# Altium footprint library KBP206G.PcbLib: 1 footprints
Each footprint in its own frame and in the unit in brackets; x right, y up, seen from the top. Pads: shape width x height; smd on the part's side, far side on the other; paste and mask are expansions set on the pad; w line width, h text height; cw(c..) or ccw(c..) is an arc to the next point about the centre after c.
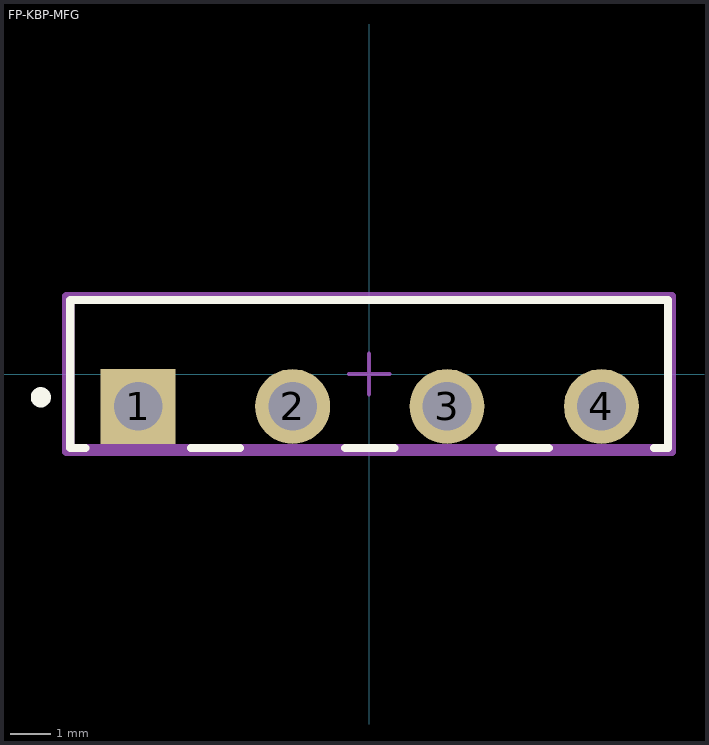
[diagram p0: the footprint, top view; thin cyan lines are the x and y axes]

## FP-KBP-MFG [mm]
pads (4):
  rect 1.85x1.85 hole 1.2 paste-2539.97 mask+0: 1(-5.7,-0.8)
  round 1.85 hole 1.2 paste-2539.97 mask+0: 2(-1.89,-0.8) 3(1.92,-0.8) 4(5.73,-0.8)
Top Overlay:
  circle w0.25: c-8.1,-0.575 r0.125
  lines w0.2: -7,-1.825 -7.375,-1.825 -7.375,1.825 7.375,1.825 7.375,-1.825 7.03,-1.825 ; -4.4,-1.825 -3.19,-1.825 ; -0.59,-1.825 0.62,-1.825 ; 3.22,-1.825 4.43,-1.825
Top Assembly:
  lines w0.2: -7.475,-1.925 -7.475,1.925 7.475,1.925 7.475,-1.925 -7.475,-1.925
  text ".Designator" at 0,0.189 h1
Top 3D Body:
  lines w0.2: -7.375,-1.825 -7.375,1.825 7.375,1.825 7.375,-1.825 -7.375,-1.825
Top Courtyard:
  lines w0.2: -7.475,-1.925 -7.475,1.925 7.475,1.925 7.475,-1.925 -7.475,-1.925
Top Component Center:
  lines w0.1: -0.5,0 0.5,0 ; 0,-0.5 0,0.5
3D body "Diode_Diodes_Inc_KBP206G_eec.STEP": height 0.25, standoff 0, extent -7.475,-1.925 7.475,1.925